# Altium schematic symbol library Senzor.SchLib: 8 symbols
Pins are listed as number, name and electrical type; pins without a type are passive.

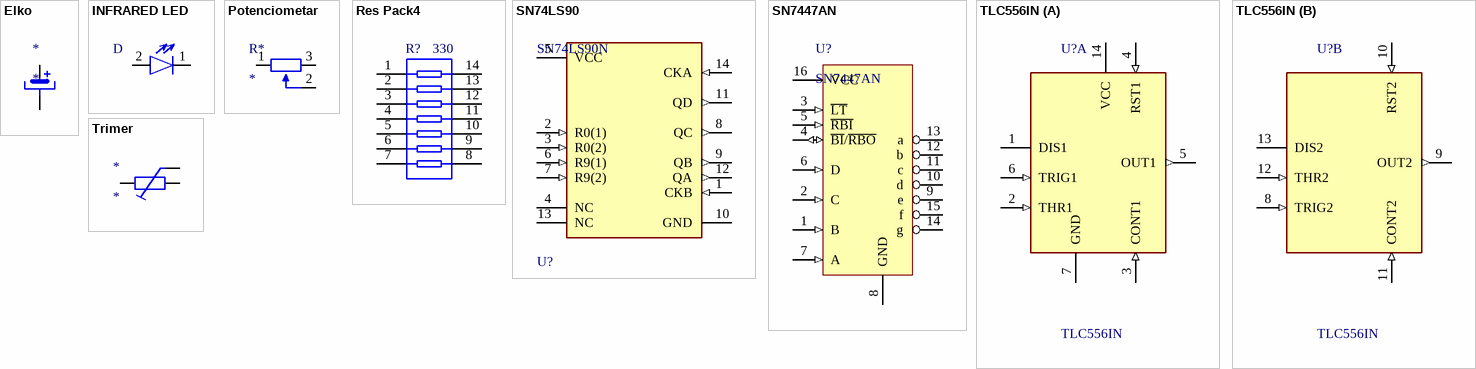
[diagram p0: symbols Elko to Trimer]

## Elko
designator *
footprint CAPR5-4x5 (Footprint not found)
pins: 1, 2

## INFRARED LED
designator D
footprint vish-tsal6200 (THD, 2-Leads, Dia 5.8mm, Pitch 2.54mm)
pins: 1, 2

## Potenciometar
designator R*
footprint TRIM_PT01-D120D-B104
pins: 1, 2, 3

## Res Pack4
designator R?, comment 330
Isolated Resistor Network; Value: 1K; Published: 24-Mar-1999; LatestRevisionDate: 29-May-2009; LatestRevisionNote: IPC-7351 Footprint Added.; PackageVersion: Oct-2003; PackageReference: SSOP16; Publisher: Altium Limited; PackageDescription: 16-Pin Plastic Small Outline Package 0.65 mm Pitch; Code_JEDEC: MO-150-AC; Code_IPC: SOP65P780-16
footprint DIP-14 (Footprint not found)
pins: 1, 2, 3, 4, 5, 6, 7, 8, 9, 10, 11, 12, 13, 14

## SN74LS90
designator U?, comment SN74LS90N
IC DECADE COUNTER 14-DIP; Direction: Up; Clock Edge Trigger Type: Negative Edge; Max Supply Voltage: 5.25V; Output Current: 400uA; Number of Elements: 1; Operating Supply Voltage: 5V; Min Supply Voltage: 4.75V; Number of Bits: 4; Turn-On Delay Time: 50ns; Reset: Asynchronous; Frequency: 42MHz; Max Operating Temperature: 70°C; Logic Function: Counter; REACH SVHC: No SVHC; Contact Plating: Gold; Height: 4.57mm; Mount: Through Hole; Lead Free: Lead Free; Packaging: Rail/Tube; Width: 6.35mm; Weight: 0.032734oz; Number of Pins: 14; Case/Package: PDIP; RoHS Compliant: Yes; Propagation Delay: 50ns; Min Operating Temperature: 0°C; Radiation Hardening: No; Number of Bits per Element: 4; Length: 19.3mm; Package Quantity: 25
footprint FP-N0014A-MFG
footprint FP-N0014A-MFG
pins: 1 CKB (in), 2 R0(1) (in), 3 R0(2) (in), 4 NC, 5 VCC (power), 6 R9(1) (in), 7 R9(2) (in), 8 QC (out), 9 QB (out), 10 GND (power), 11 QD (out), 12 QA (out), 13 NC, 14 CKA (in)

## SN7447AN
designator U?
BCD-to-7-Segment Decoder / Driver, 4.75 to 5.25 V, 0 to 70 degC, 16-pin DIP (N16), Pb-Free (RoHS); Manufacturer: Texas Instruments; SubFamily: Discrete Segment LED Driver; Vin(Max)(V): 5.25; Vin(Min)(V): 4.75; ComponentLink2Description: Datasheet; ComponentLink1URL: http://www.ti.com/; Mounting Technology: Through Hole; PackageReference: N0016A; ComponentLink1Description: Manufacturer URL; PartNumber: SN7447AN; PackageVersion: 4040049/E; ComponentLink3URL: http://www.ti.com/litv/pdf/mpdi002c; DatasheetVersion: SDLS111; ComponentLink2URL: http://www.ti.com/general/docs/lit/getliterature.tsp?genericPartNumber=SN7447A&fileType=pdf; Code_JEDEC: MS-001; ComponentLink3Description: Package Specification; Eco-Plan: Pb-Free (RoHS); PackageDescription: 16-Pin Plastic In-Line, Body 19.305 x 6.35 mm, Pitch 2.54 mm
footprint N0016A (DIP, 16-Leads, Body 19.7x6.6mm, Pitch 2.54mm)
pins: 1 B (in), 2 C (in), 3 ~{LT} (in), 4 ~{BI}/~{RBO} (io), 5 ~{RBI} (in), 6 D (in), 7 A (in), 8 GND (power), 9 e (oc), 10 d (oc), 11 c (oc), 12 b (oc), 13 a (oc), 14 g (oc), 15 f (oc), 16 VCC (power)

## TLC556IN
designator U?
IC OSC TIMER DUAL 2.1MHZ 14-DIP; Quiescent Current: 130uA; Min Supply Voltage: 3V; Low Level Output Current: 100mA; Operating Supply Current: 720uA; Max Power Dissipation: 1.15W; Number of Channels: 2; Max Supply Voltage: 18V; High Level Output Current: -10mA; Case/Package: PDIP; Series: TLC556; Supply Current: 130uA; Packaging: Rail/Tube; RoHS Compliant: Yes; REACH SVHC: No SVHC; Min Operating Temperature: -40°C; Max Operating Temperature: 85°C; Package Quantity: 25; Number of Pins: 14; Contact Plating: Gold; Termination: Through Hole; Frequency: 2.1MHz; Power Dissipation: 1.15W; Number of Timers/Counters: 2; Weight: 0.032734oz; Height: 4.57mm; Radiation Hardening: No; Mount: Through Hole; Nominal Supply Current: 130uA; Width: 6.35mm; Length: 19.3mm; Lead Free: Lead Free
footprint FP-N0014A-MFG
part A pins: 1 DIS1 (oc), 2 THR1 (in), 3 CONT1 (in), 4 RST1 (in), 5 OUT1 (out), 6 TRIG1 (in), 7 GND (power), 14 VCC (power)
part B pins: 8 TRIG2 (in), 9 OUT2 (out), 10 RST2 (in), 11 CONT2 (in), 12 THR2 (in), 13 DIS2 (oc)

## Trimer
designator *
pins: 1, 2, 3